# Altium footprint library Module.PcbLib: 88 footprints (part 4 of 6)
Each footprint in its own frame and in the unit in brackets; x right, y up, seen from the top. Pads: shape width x height; smd on the part's side, far side on the other; paste and mask are expansions set on the pad; w line width, h text height; cw(c..) or ccw(c..) is an arc to the next point about the centre after c.
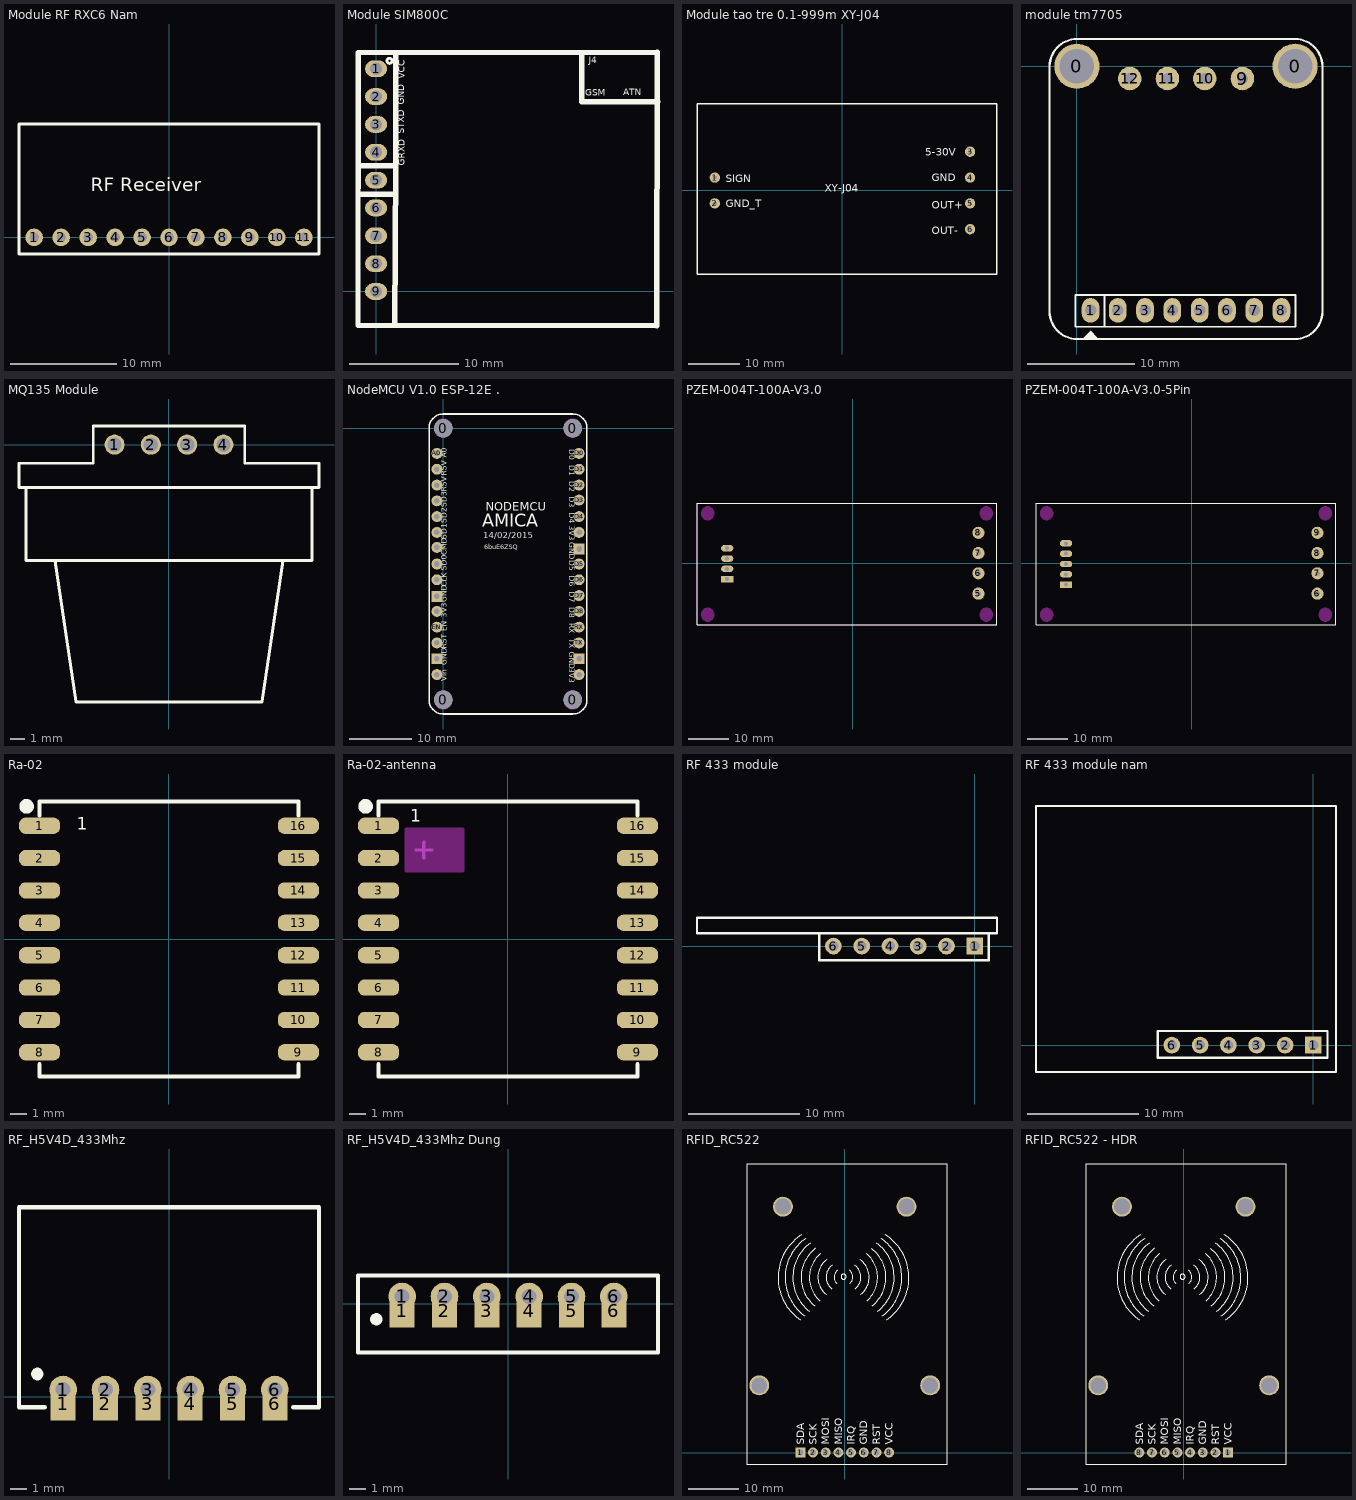
[diagram p3: the footprints below, top view; thin cyan lines are the x and y axes]

## Module RF RXC6 Nam [mm] "RXC6 433M Receiver"
pads (11):
  round 1.66 hole 0.9: 1(-12.7,0) 2(-10.16,0) 3(-7.62,0) 4(-5.08,0) 5(-2.54,0) 6(0,0) 7(2.54,0) 8(5.08,0) 9(7.62,0) 10(10.16,0) 11(12.7,0)
Top Overlay:
  lines w0.254: -14.127,-1.575 -14.127,10.679 14.127,10.679 14.127,-1.575 -14.127,-1.575
  text "RF Receiver" at -7.366,4.318 h1.27
Top Designator:
  text ".Designator" at -3.711,4.208 h1.52
3D body "Module RXC6 RF433.step": height 5.9, standoff -1.7, extent -14,-1.448 14,10.552

## Module SIM800C [mm]
height 1.27
pads (9):
  oval 2x1.52 hole 1.1: 1(0,20.32) 2(0,17.78) 3(0,15.24) 4(0,12.7) 5(0,10.16) 6(0,7.62) 7(0,5.08) 8(0,2.54) 9(0,0)
Top Overlay:
  circle w0.254: c1.228,21.042 r0.233
  lines w0.5: -1.637,8.869 1.544,8.869 ; -1.637,11.489 1.801,11.462 ; 1.707,-3.028 1.801,11.462 ; 1.801,21.752 1.801,11.462 ; 18.741,21.74 18.764,17.288 25.718,17.318 ; -1.648,-3.064 -1.643,21.774 25.664,21.83 25.624,-3.131 -1.648,-3.064
  text "GRXD" at 2.824,11.457 h1
  text "STXD" at 2.805,14.394 h1
  text "GND" at 2.805,17.054 h1
  text "VCC" at 2.824,19.404 h1
  text "J4" at 19.405,20.605 h1
  text "ATN" at 22.544,17.685 h1
  text "GSM" at 19.078,17.63 h1
Top Designator:
  text ".Designator" at 8.324,9.005 h1.52
3D body "SIM800.step": height 7.15, standoff -1.25, extent -1.644,-3.137 25.661,21.863

## Module tao tre 0.1-999m XY-J04 [mil]
pads (6):
  round 80 hole 32: 1(-988.19,100) 2(-988.19,-100) 3(988.19,300) 4(988.19,100) 5(988.19,-100) 6(988.19,-300)
Top Overlay:
  lines w10: -1125.98,-648.03 1196.85,-648.03 1196.85,670.87 -1125.98,670.87 -1125.98,-648.03
  text "OUT-" at 691.81,-340 h60
  text "OUT+" at 691.81,-140 h60
  text "GND" at 691.81,70 h60
  text "5-30V" at 641.83,270 h60
  text "SIGN" at -903.19,65 h60
  text "GND_T" at -903.19,-130 h60
  text "XY-J04" at -138.19,-10 h60
Top Designator:
  text ".Designator" at -110.67,-2.13 h60

## module tm7705 [mil]
pads (14):
  round 165.35 hole 125.98: 0(0,0) 0(800,0)
  oval 65x90 hole 42: 1(50,-895) 2(150,-895) 3(250,-895) 4(350,-895) 5(450,-895) 6(550,-895) 7(650,-895) 8(750,-895)
  round 86 hole 39.37: 9(606.93,-45) 10(469.13,-45) 11(331.93,-45) 12(194.13,-45)
Top Overlay:
  region: 50,-970 25,-995 75,-995
  lines w7: 101,-955 101,-839 ; -6,-955 802,-955 802,-838 -6,-838 -6,-955
  lines w7.87: -100,-900 ccw(c0,-900) 0,-1000 800,-1000 ccw(c800,-900) 900,-900 900,0 ccw(c800,0) 800,100 0,100 ccw(c0,0) -100,0 -100,-900
Top Designator:
  text ".Designator" at 253.9,-463.55 h60
3D body "pcb214.STEP": height 348.53, standoff -222.33, extent -100,-1000 900,100

## MQ135 Module [mm]
pads (4):
  round 1.4 / inner round 1.4 / far side oval 1.4x2.2 hole 1 mask+0.1: 1(-3.81,0) 2(-1.27,0) 3(1.27,0) 4(3.81,0)
Top Overlay:
  lines w0.2: -10,-3 -10,-8.1 10,-8.1 10,-3 ; -7.985,-8.101 -6.5,-18 ; -6.5,-18.014 6.5,-18.014 ; 6.5,-18 7.985,-8.101 ; -10.5,-3 -10.5,-1.3 -5.3,-1.3 -5.3,1.3 5.3,1.3 5.3,-1.3 10.5,-1.3 10.5,-3 -10.5,-3
Top Designator:
  text ".Designator" at -3.711,-0.394 h1.52
3D body "female_header_a-bl254-eg-g04d.stp": height 8.5, standoff -3.2, extent -5.205,-1.25 5.205,1.25
3D body "MQ135_MH_sensor_with_socket_pins_90grd.STEP": height 42.87, standoff 2.51, extent -10.5,-18.014 10.5,5

## NodeMCU V1.0 ESP-12E . [mil]
pads (34):
  round 115 hole 115 unplated paste-99999 mask-300: 0(0,-1720) 0(0,0) 0(820,-1720) 0(820,0)
  round 69 hole 35: 3V3(-40,-1160) 3V3(860,-1560) 3V3(860,-660) A0(-40,-160) CLK(-40,-960) CMD(-40,-755) D0(860,-160) D1(860,-260) D2(860,-360) D3(860,-455) D4(860,-560) D5(860,-860) D6(860,-960) D7(860,-1060) D8(860,-1160) EN(-40,-1260) RST(-40,-1360) RSV(-40,-360) RSV(-40,-260) RX(860,-1260) SD0(-40,-860) SD1(-40,-660) SD2(-40,-560) SD3(-40,-460) TX(860,-1360) VIN(-40,-1560)
  rect 69x69 hole 35: GND(-40,-1460) GND(-40,-1065) GND(860,-1460) GND(860,-765)
Top Overlay:
  lines w10: -90,-1720 ccw(c0,-1720) 0,-1810 820,-1810 ccw(c820,-1720) 910,-1720 910,0 ccw(c820,0) 820,90 0,90 ccw(c0,0) -90,0 -90,-1720
  text "GND" at 35,-1102 h60
  text "3V3" at 35,-1199 h60
  text "EN" at 35,-1286 h60
  text "RST" at 35,-1398 h60
  text "GND" at 35,-1501 h60
  text "Vin" at 35,-1601 h60
  text "D7" at 785,-1035.23 h60
  text "D8" at 785,-1135.11 h60
  text "RX" at 785,-1234.06 h60
  text "TX" at 785,-1333 h60
  text "GND" at 785,-1416.2 h60
  text "3V3" at 785,-1520 h60
  text "D6" at 785,-934.12 h60
  text "CMD" at 35,-803.14 h60
  text "D0" at 785,-134 h60
  text "D1" at 785,-235.35 h60
  text "D2" at 785,-335.58 h60
  text "D3" at 785,-435.58 h60
  text "D4" at 785,-534 h60
  text "3V3" at 785,-619.01 h60
  text "GND" at 785,-721 h60
  text "D5" at 785,-835 h60
  text "A0" at 35,-187 h60
  text "RSV" at 35,-301 h60
  text "RSV" at 35,-401.43 h60
  text "SD3" at 35,-501.86 h60
  text "SD2" at 35,-602.29 h60
  text "SD1" at 35,-702.71 h60
  text "SD0" at 35,-903.57 h60
  text "CLK" at 35,-1004 h60
  text "6buE6ZSQ" at 258,-767 h30
  text "NODEMCU" at 269,-543 h90
  text "AMICA" at 248,-653 h140
  text "14/02/2015" at 254,-712 h69
Keep-Out Layer:
  circle w2: c0,-1720 r57.5
  circle w2: c820,-1720 r57.5
  circle w2: c820,0 r57.5
  circle w2: c0,0 r57.5
Top Designator:
  text ".Designator" at 264.88,-876.53 h60
3D body "ESP8266 v7 (1).stp": height 310.63, standoff -244.1, extent -88.95,-1824 916.95,98.04

## PZEM-004T-100A-V3.0 [mm]
pads (8):
  rect 3x1.6 hole 1: 1(-30.98,-3.938)
  oval 3x1.6 hole 1: 2(-30.981,-1.398) 3(-30.98,1.148) 4(-30.98,3.692)
  round 3 hole 1.2: 5(30.981,-7.5) 6(30.981,-2.499) 7(30.981,2.497) 8(30.981,7.501)
Top Overlay:
  lines w0.254: -38.433,-15.195 -38.433,14.805 35.567,14.805 35.567,-15.195 -38.433,-15.195
Keep-Out Layer:
  board cut-out: 31.337,-12.705 31.337,-12.861 31.398,-13.169 31.518,-13.458 31.692,-13.718 31.913,-13.94 32.174,-14.114 32.463,-14.234 32.77,-14.295 32.927,-14.295 33.083,-14.295 33.391,-14.234 33.68,-14.114 33.94,-13.94 34.162,-13.718 34.336,-13.458 34.456,-13.169 34.517,-12.861 34.517,-12.705 34.517,-12.548 34.456,-12.241 34.336,-11.952 34.162,-11.691 33.94,-11.47 33.68,-11.296 33.391,-11.176 33.083,-11.115 32.927,-11.115 32.77,-11.115 32.463,-11.176 32.174,-11.296 31.913,-11.47 31.692,-11.691 31.518,-11.952 31.398,-12.241 31.337,-12.548
  board cut-out: -35.793,10.725 -35.95,10.725 -36.257,10.786 -36.546,10.906 -36.807,11.08 -37.028,11.302 -37.202,11.562 -37.322,11.851 -37.383,12.158 -37.383,12.315 -37.383,12.472 -37.322,12.779 -37.202,13.068 -37.028,13.329 -36.807,13.55 -36.546,13.724 -36.257,13.844 -35.95,13.905 -35.793,13.905 -35.637,13.905 -35.329,13.844 -35.04,13.724 -34.78,13.55 -34.558,13.329 -34.384,13.068 -34.264,12.779 -34.203,12.472 -34.203,12.315 -34.203,12.158 -34.264,11.851 -34.384,11.562 -34.558,11.302 -34.78,11.08 -35.04,10.906 -35.329,10.786 -35.637,10.725
  board cut-out: -35.793,-14.295 -35.95,-14.295 -36.257,-14.234 -36.546,-14.114 -36.807,-13.94 -37.028,-13.718 -37.202,-13.458 -37.322,-13.169 -37.383,-12.861 -37.383,-12.705 -37.383,-12.548 -37.322,-12.241 -37.202,-11.952 -37.028,-11.691 -36.807,-11.47 -36.546,-11.296 -36.257,-11.176 -35.95,-11.115 -35.793,-11.115 -35.637,-11.115 -35.329,-11.176 -35.04,-11.296 -34.78,-11.47 -34.558,-11.691 -34.384,-11.952 -34.264,-12.241 -34.203,-12.548 -34.203,-12.705 -34.203,-12.861 -34.264,-13.169 -34.384,-13.458 -34.558,-13.718 -34.78,-13.94 -35.04,-14.114 -35.329,-14.234 -35.637,-14.295
  board cut-out: 31.337,12.315 31.337,12.158 31.398,11.851 31.518,11.562 31.692,11.302 31.913,11.08 32.174,10.906 32.463,10.786 32.77,10.725 32.927,10.725 33.083,10.725 33.391,10.786 33.68,10.906 33.94,11.08 34.162,11.302 34.336,11.562 34.456,11.851 34.517,12.158 34.517,12.315 34.517,12.472 34.456,12.779 34.336,13.068 34.162,13.329 33.94,13.55 33.68,13.724 33.391,13.844 33.083,13.905 32.927,13.905 32.77,13.905 32.463,13.844 32.174,13.724 31.913,13.55 31.692,13.329 31.518,13.068 31.398,12.779 31.337,12.472
Keep-Out Layer:
  circle w0.254: c-35.793,-12.705 r1.59
  circle w0.254: c32.927,-12.705 r1.59
  circle w0.254: c32.927,12.315 r1.59
  circle w0.254: c-35.793,12.315 r1.59
Top Designator:
  circle w0.254: c-30.98,-3.939 r0.5
  circle w0.254: c-30.981,-1.399 r0.5
  circle w0.254: c-30.98,1.148 r0.5
  circle w0.254: c-30.98,3.692 r0.5
  circle w0.254: c30.981,-7.5 r0.5
  circle w0.254: c30.981,-2.499 r0.5
  circle w0.254: c30.981,2.497 r0.5
  circle w0.254: c30.981,7.5 r0.5
  lines w0.254: -38.433,-15.195 -38.433,14.805 35.567,14.805 35.567,-15.195 -38.433,-15.195
  text ".Designator" at -5.144,-0.539 h1.52
3D body "Pzem-004t.SLDPRT": height 11.24, standoff 0.2, extent -38.533,-15.195 35.667,14.805

## PZEM-004T-100A-V3.0-5Pin [mm]
pads (9):
  rect 3x1.6 hole 1: 1(-30.98,-5.282)
  oval 3x1.6 hole 1: 2(-30.981,-2.742) 3(-30.98,-0.196) 4(-30.98,2.348) 5(-30.98,4.892)
  round 3 hole 1.2: 6(30.981,-7.501) 7(30.981,-2.499) 8(30.981,2.496) 9(30.981,7.501)
Top Overlay:
  lines w0.254: -38.4,-15.195 -38.4,14.805 35.567,14.805 35.567,-15.195 -38.4,-15.195
Keep-Out Layer:
  board cut-out: 31.337,-12.705 31.337,-12.862 31.398,-13.169 31.518,-13.458 31.692,-13.718 31.913,-13.94 32.174,-14.114 32.463,-14.234 32.77,-14.295 32.927,-14.295 33.083,-14.295 33.391,-14.234 33.68,-14.114 33.94,-13.94 34.162,-13.718 34.336,-13.458 34.456,-13.169 34.517,-12.862 34.517,-12.705 34.517,-12.548 34.456,-12.241 34.336,-11.952 34.162,-11.691 33.94,-11.47 33.68,-11.296 33.391,-11.176 33.083,-11.115 32.927,-11.115 32.77,-11.115 32.463,-11.176 32.174,-11.296 31.913,-11.47 31.692,-11.691 31.518,-11.952 31.398,-12.241 31.337,-12.548
  board cut-out: -35.793,10.725 -35.95,10.725 -36.257,10.786 -36.546,10.906 -36.807,11.08 -37.028,11.302 -37.202,11.562 -37.322,11.851 -37.383,12.158 -37.383,12.315 -37.383,12.472 -37.322,12.779 -37.202,13.068 -37.028,13.329 -36.807,13.55 -36.546,13.724 -36.257,13.844 -35.95,13.905 -35.793,13.905 -35.637,13.905 -35.329,13.844 -35.04,13.724 -34.78,13.55 -34.558,13.329 -34.384,13.068 -34.264,12.779 -34.203,12.472 -34.203,12.315 -34.203,12.158 -34.264,11.851 -34.384,11.562 -34.558,11.302 -34.78,11.08 -35.04,10.906 -35.329,10.786 -35.637,10.725
  board cut-out: -35.793,-14.295 -35.95,-14.295 -36.257,-14.234 -36.546,-14.114 -36.807,-13.94 -37.028,-13.718 -37.202,-13.458 -37.322,-13.169 -37.383,-12.862 -37.383,-12.705 -37.383,-12.548 -37.322,-12.241 -37.202,-11.952 -37.028,-11.691 -36.807,-11.47 -36.546,-11.296 -36.257,-11.176 -35.95,-11.115 -35.793,-11.115 -35.637,-11.115 -35.329,-11.176 -35.04,-11.296 -34.78,-11.47 -34.558,-11.691 -34.384,-11.952 -34.264,-12.241 -34.203,-12.548 -34.203,-12.705 -34.203,-12.862 -34.264,-13.169 -34.384,-13.458 -34.558,-13.718 -34.78,-13.94 -35.04,-14.114 -35.329,-14.234 -35.637,-14.295
  board cut-out: 31.337,12.315 31.337,12.158 31.398,11.851 31.518,11.562 31.692,11.302 31.913,11.08 32.174,10.906 32.463,10.786 32.77,10.725 32.927,10.725 33.083,10.725 33.391,10.786 33.68,10.906 33.94,11.08 34.162,11.302 34.336,11.562 34.456,11.851 34.517,12.158 34.517,12.315 34.517,12.472 34.456,12.779 34.336,13.068 34.162,13.329 33.94,13.55 33.68,13.724 33.391,13.844 33.083,13.905 32.927,13.905 32.77,13.905 32.463,13.844 32.174,13.724 31.913,13.55 31.692,13.329 31.518,13.068 31.398,12.779 31.337,12.472
Keep-Out Layer:
  circle w0.254: c-35.793,-12.705 r1.59
  circle w0.254: c32.927,-12.705 r1.59
  circle w0.254: c32.927,12.315 r1.59
  circle w0.254: c-35.793,12.315 r1.59
Top Designator:
  text ".Designator" at -5.131,-0.539 h1.52
3D body "Pzem-004t.SLDPRT": height 11.24, standoff 0.2, extent -38.533,-15.195 35.667,14.805

## Ra-02 [mm]
pads (16):
  rrect80% 2.54x1 smd: 1(-8,7) 2(-8,5) 3(-8,3) 4(-8,1) 5(-8,-1) 6(-8,-3) 7(-8,-5) 8(-8,-7) 9(8,-7) 10(8,-5) 11(8,-3) 12(8,-1) 13(8,1) 14(8,3) 15(8,5) 16(8,7)
Top Overlay:
  circle w0.5: c-8.8,8.2 r0.2
  lines w0.254: -8,-7.738 -8,-8.5 8,-8.5 8,-7.74 ; -8,7.629 -8,8.5 8,8.5 8,7.631
  text "1" at -5.714,6.74 h0.76
Top Designator:
  text ".Designator" at -3.711,-0.333 h1.52
3D body "User Library-RA-02.STEP": height 3.2, standoff 0, extent -7.999,-8.491 8.001,8.509

## Ra-02-antenna [mm]
pads (16):
  rrect80% 2.54x1 smd: 1(-8,7) 2(-8,5) 3(-8,3) 4(-8,1) 5(-8,-1) 6(-8,-3) 7(-8,-5) 8(-8,-7) 9(8,-7) 10(8,-5) 11(8,-3) 12(8,-1) 13(8,1) 14(8,3) 15(8,5) 16(8,7)
Top Overlay:
  circle w0.5: c-8.8,8.2 r0.2
  lines w0.254: -8,-7.738 -8,-8.5 8,-8.5 8,-7.74 ; -8,7.629 -8,8.5 8,8.5 8,7.631
  text "1" at -6.027,7.248 h0.76
Keep-Out Layer:
  board cut-out: -6.3,4.2 -2.8,4.2 -2.8,6.8 -6.3,6.8
Keep-Out Layer:
  lines w0.2: -6.3,4.2 -6.3,6.8 -2.8,6.8 -2.8,4.2 -6.3,4.2
Mechanical 1:
  lines w0.2: -5.7,5.5 -4.7,5.5 ; -5.2,5 -5.2,6
Top Designator:
  text ".Designator" at -3.711,-0.333 h1.52
3D body "LoRa_Module_RA-02_AiThinker.step": height 3.03, standoff 0, extent -8,-8.5 8,8.5

## RF 433 module [mm] "Connector; Header; 6 Position; Right Angle"
pads (6):
  rect 1.5x1.5 hole 0.9: 1(0,0)
  round 1.5 hole 0.9: 2(-2.54,0) 3(-5.08,0) 4(-7.62,0) 5(-10.16,0) 6(-12.7,0)
Top Overlay:
  lines w0.2: -13.981,-1.239 -13.981,1.143 ; -13.97,-1.27 1.259,-1.27 1.259,1.143 ; -24.968,1.143 -24.968,2.54 2,2.54 2,1.143 -24.968,1.143
Top Designator:
  text ".Designator" at -15.195,1.596 h1.52
3D body "User Library-0_1inch 2 pin strip right angle.step": height 4.33, standoff -3, extent -3.81,-1.27 1.27,7
3D body "User Library-0_1inch 2 pin strip right angle.step": height 4.33, standoff -3, extent -8.89,-1.27 -3.81,7
3D body "rf.step": height 25.41, standoff 2.41, extent -24.892,-3.119 1.108,4.39
3D body "User Library-0_1inch 2 pin strip right angle.step": height 4.33, standoff -3, extent -13.97,-1.27 -8.89,7

## RF 433 module nam [mm] "Connector; Header; 6 Position; Right Angle"
pads (6):
  rect 1.5x1.5 hole 0.9: 1(0,0)
  round 1.5 hole 0.9: 2(-2.54,0) 3(-5.08,0) 4(-7.62,0) 5(-10.16,0) 6(-12.7,0)
Top Overlay:
  lines w0.2: -24.892,-2.425 -24.892,21.463 2.032,21.466 2.032,-2.413 -24.892,-2.413 -13.97,-2.413 ; 1.27,-1.143 -12.7,-1.143 -13.959,-1.143 -13.959,1.27 1.27,1.27 ; 1.281,-1.143 1.281,1.239
Top Designator:
  text ".Designator" at -15.141,9.176 h1.52
3D body: height 4.19, standoff -3.81, extent -13.11,-0.407 -12.31,0.393
3D body "rf.step": height 4.01, standoff -3.5, extent -24.247,-1.803 1.753,21.197
3D body: height 1.5, standoff 0, extent -1.27,-1.27 1.27,1.27
3D body: height 4.19, standoff -3.81, extent -0.41,-0.407 0.39,0.393
3D body: height 1.5, standoff 0, extent -3.81,-1.27 -1.27,1.27
3D body: height 4.19, standoff -3.81, extent -2.95,-0.407 -2.15,0.393
3D body: height 1.5, standoff 0, extent -6.35,-1.27 -3.81,1.27
3D body: height 4.19, standoff -3.81, extent -5.49,-0.407 -4.69,0.393
3D body: height 1.5, standoff 0, extent -8.89,-1.27 -6.35,1.27
3D body: height 4.19, standoff -3.81, extent -8.03,-0.407 -7.23,0.393
3D body: height 1.5, standoff 0, extent -11.43,-1.27 -8.89,1.27
3D body: height 4.19, standoff -3.81, extent -10.57,-0.407 -9.77,0.393
3D body: height 1.5, standoff 0, extent -13.97,-1.27 -11.43,1.27

## RF_H5V4D_433Mhz [mm]
pads (12):
  rect 1.5x2 smd mask+0.102: 1(-6.35,-0.433) 2(-3.81,-0.433) 3(-1.27,-0.433) 4(1.27,-0.433) 5(3.81,-0.433) 6(6.35,-0.433)
  round 1.66 hole 0.9: 1(-6.35,0.433) 2(-3.81,0.433) 3(-1.27,0.433) 4(1.27,0.433) 5(3.81,0.433) 6(6.35,0.433)
Top Overlay:
  region: -7.9,1.006 -7.972,1.006 -8.104,1.061 -8.206,1.162 -8.261,1.295 -8.261,1.367 -8.261,1.438 -8.206,1.571 -8.104,1.672 -7.972,1.727 -7.9,1.727 -7.828,1.727 -7.696,1.672 -7.594,1.571 -7.539,1.438 -7.539,1.367 -7.539,1.295 -7.594,1.162 -7.696,1.061 -7.828,1.006
  lines w0.254: -7.45,-0.633 -9,-0.633 -9,11.367 9,11.367 9,-0.633 7.45,-0.633
Top Designator:
  text ".Designator" at -3.711,4.635 h1.52
Mechanical 12:
  text ".Designator" at -6.086,4.802 h2.5
3D body "MODUN RF H3V4F KHONG CHAN CAM.step": height 2.6, standoff 0.06, extent -9,-0.633 9,11.367

## RF_H5V4D_433Mhz Dung [mm]
pads (12):
  rect 1.5x2 smd mask+0.102: 1(-6.35,-0.433) 2(-3.81,-0.433) 3(-1.27,-0.433) 4(1.27,-0.433) 5(3.81,-0.433) 6(6.35,-0.433)
  round 1.66 hole 0.9: 1(-6.35,0.433) 2(-3.81,0.433) 3(-1.27,0.433) 4(1.27,0.433) 5(3.81,0.433) 6(6.35,0.433)
Top Overlay:
  region: -7.9,-1.294 -7.972,-1.294 -8.104,-1.239 -8.206,-1.138 -8.261,-1.005 -8.261,-0.933 -8.261,-0.862 -8.206,-0.729 -8.104,-0.628 -7.972,-0.573 -7.9,-0.573 -7.828,-0.573 -7.696,-0.628 -7.594,-0.729 -7.539,-0.862 -7.539,-0.933 -7.539,-1.005 -7.594,-1.138 -7.696,-1.239 -7.828,-1.294
  lines w0.254: -9,-2.933 9,-2.933 9,1.7 -9,1.7 -9,-2.933
Top Designator:
  text ".Designator" at -3.711,-0.961 h1.52
Mechanical 12:
  text ".Designator" at -6.086,-0.564 h2.5
3D body "MODUN RF H3V4F KHONG CHAN CAM.step": height 12.15, standoff 0.15, extent -8.957,-2.95 9.043,-0.409

## RFID_RC522 [mm] "RFID module header RC522"
pads (12):
  rect 2x2 hole 1.2: 1(-8.89,0)
  round 2 hole 1.2: 2(-6.35,0) 3(-3.81,0) 4(-1.27,0) 5(1.27,0) 6(3.81,0) 7(6.35,0) 8(8.89,0)
  round 4 hole 3.2: ""(-17.13,13.47) ""(-12.38,49.25) ""(12.37,49.25) ""(17.12,13.47)
Top Overlay:
  circle w0.2: c-0.237,35.214 r0.508
  lines w0.2: -8.88,26.568 cw(c-3.138,35.032) -8.67,43.635 ; -8.06,27.392 cw(c-2.491,35.033) -7.848,42.825 ; -7.128,28.323 cw(c-1.866,35.055) -6.947,41.924 ; -6.05,29.401 cw(c-1.466,35.076) -5.895,40.872 ; -5.004,30.447 cw(c-0.877,35.092) -4.905,39.824 ; -3.739,31.712 cw(c-1.067,35.129) -3.643,38.62 ; -2.616,32.835 cw(c-0.783,35.156) -2.55,37.527 ; -1.558,33.894 cw(c-0.433,35.179) -1.519,36.496 ; 1.012,36.492 cw(c-0.075,35.174) 1.05,33.89 ; 2.043,37.523 cw(c0.275,35.151) 2.109,32.831 ; 3.135,38.615 cw(c0.559,35.125) 3.232,31.708 ; 4.397,39.819 cw(c0.37,35.088) 4.497,30.443 ; 5.388,40.868 cw(c0.959,35.072) 5.543,29.397 ; 6.44,41.92 cw(c1.359,35.05) 6.621,28.319 ; 7.341,42.821 cw(c1.983,35.029) 7.553,27.387 ; 8.163,43.631 cw(c2.63,35.028) 8.373,26.564 ; -19.6,-2.3 -19.6,57.8 20.5,57.8 20.5,-2.3 -19.6,-2.3
  text "SDA" at -8.146,1.556 h1.52
  text "SCK" at -5.606,1.556 h1.52
  text "MOSI" at -3.066,1.556 h1.52
  text "MISO" at -0.526,1.556 h1.52
  text "IRQ" at 2.014,1.556 h1.52
  text "GND" at 4.554,1.556 h1.52
  text "RST" at 7.094,1.556 h1.52
  text "VCC" at 9.634,1.556 h1.52
Top Designator:
  text ".Designator" at -3.261,27.406 h1.52
3D body "User Library-RFID.STEP": height 10.74, standoff -0.8, extent -19.53,-2.28 20.47,57.72

## RFID_RC522 - HDR [mm] "RFID module header RC522"
pads (12):
  rect 2x2 hole 1.2: 1(8.89,0)
  round 2 hole 1.2: 2(6.35,0) 3(3.81,0) 4(1.27,0) 5(-1.27,0) 6(-3.81,0) 7(-6.35,0) 8(-8.89,0)
  round 4 hole 3.2: ""(-17.13,13.47) ""(-12.38,49.25) ""(12.37,49.25) ""(17.12,13.47)
Top Overlay:
  circle w0.2: c-0.237,35.214 r0.508
  lines w0.2: -8.88,26.568 cw(c-3.138,35.032) -8.67,43.635 ; -8.06,27.392 cw(c-2.491,35.033) -7.848,42.825 ; -7.128,28.323 cw(c-1.866,35.055) -6.947,41.924 ; -6.05,29.401 cw(c-1.466,35.076) -5.895,40.872 ; -5.004,30.447 cw(c-0.877,35.092) -4.905,39.824 ; -3.739,31.712 cw(c-1.067,35.129) -3.643,38.62 ; -2.616,32.835 cw(c-0.783,35.156) -2.55,37.527 ; -1.558,33.894 cw(c-0.433,35.179) -1.519,36.496 ; 1.012,36.492 cw(c-0.075,35.174) 1.05,33.89 ; 2.043,37.523 cw(c0.275,35.151) 2.109,32.831 ; 3.135,38.615 cw(c0.559,35.125) 3.232,31.708 ; 4.397,39.819 cw(c0.37,35.088) 4.497,30.443 ; 5.388,40.868 cw(c0.959,35.072) 5.543,29.397 ; 6.44,41.92 cw(c1.359,35.05) 6.621,28.319 ; 7.341,42.821 cw(c1.983,35.029) 7.553,27.387 ; 8.163,43.631 cw(c2.63,35.028) 8.373,26.564 ; -19.6,-2.3 20.5,-2.3 20.5,57.8 -19.6,57.8 -19.6,-2.3
  text "VCC" at 9.634,1.556 h1.52
  text "RST" at 7.094,1.556 h1.52
  text "GND" at 4.554,1.556 h1.52
  text "IRQ" at 2.014,1.556 h1.52
  text "MISO" at -0.526,1.556 h1.52
  text "MOSI" at -3.066,1.556 h1.52
  text "SCK" at -5.606,1.556 h1.52
  text "SDA" at -8.146,1.556 h1.52
Top Designator:
  text ".Designator" at -3.261,27.406 h1.52
3D body "User Library-RFID.STEP": height 14.84, standoff 3.3, extent -19.53,-2.28 20.47,57.72
3D body "female_header_a-bl254-eg-g08d.stp": height 8.5, standoff -3.2, extent -10.287,-1.25 10.283,1.25